# Altium footprint library Altium_Lib_Haris.PcbLib: 85 footprints (part 2 of 6)
Each footprint in its own frame and in the unit in brackets; x right, y up, seen from the top. Pads: shape width x height; smd on the part's side, far side on the other; paste and mask are expansions set on the pad; w line width, h text height; cw(c..) or ccw(c..) is an arc to the next point about the centre after c.
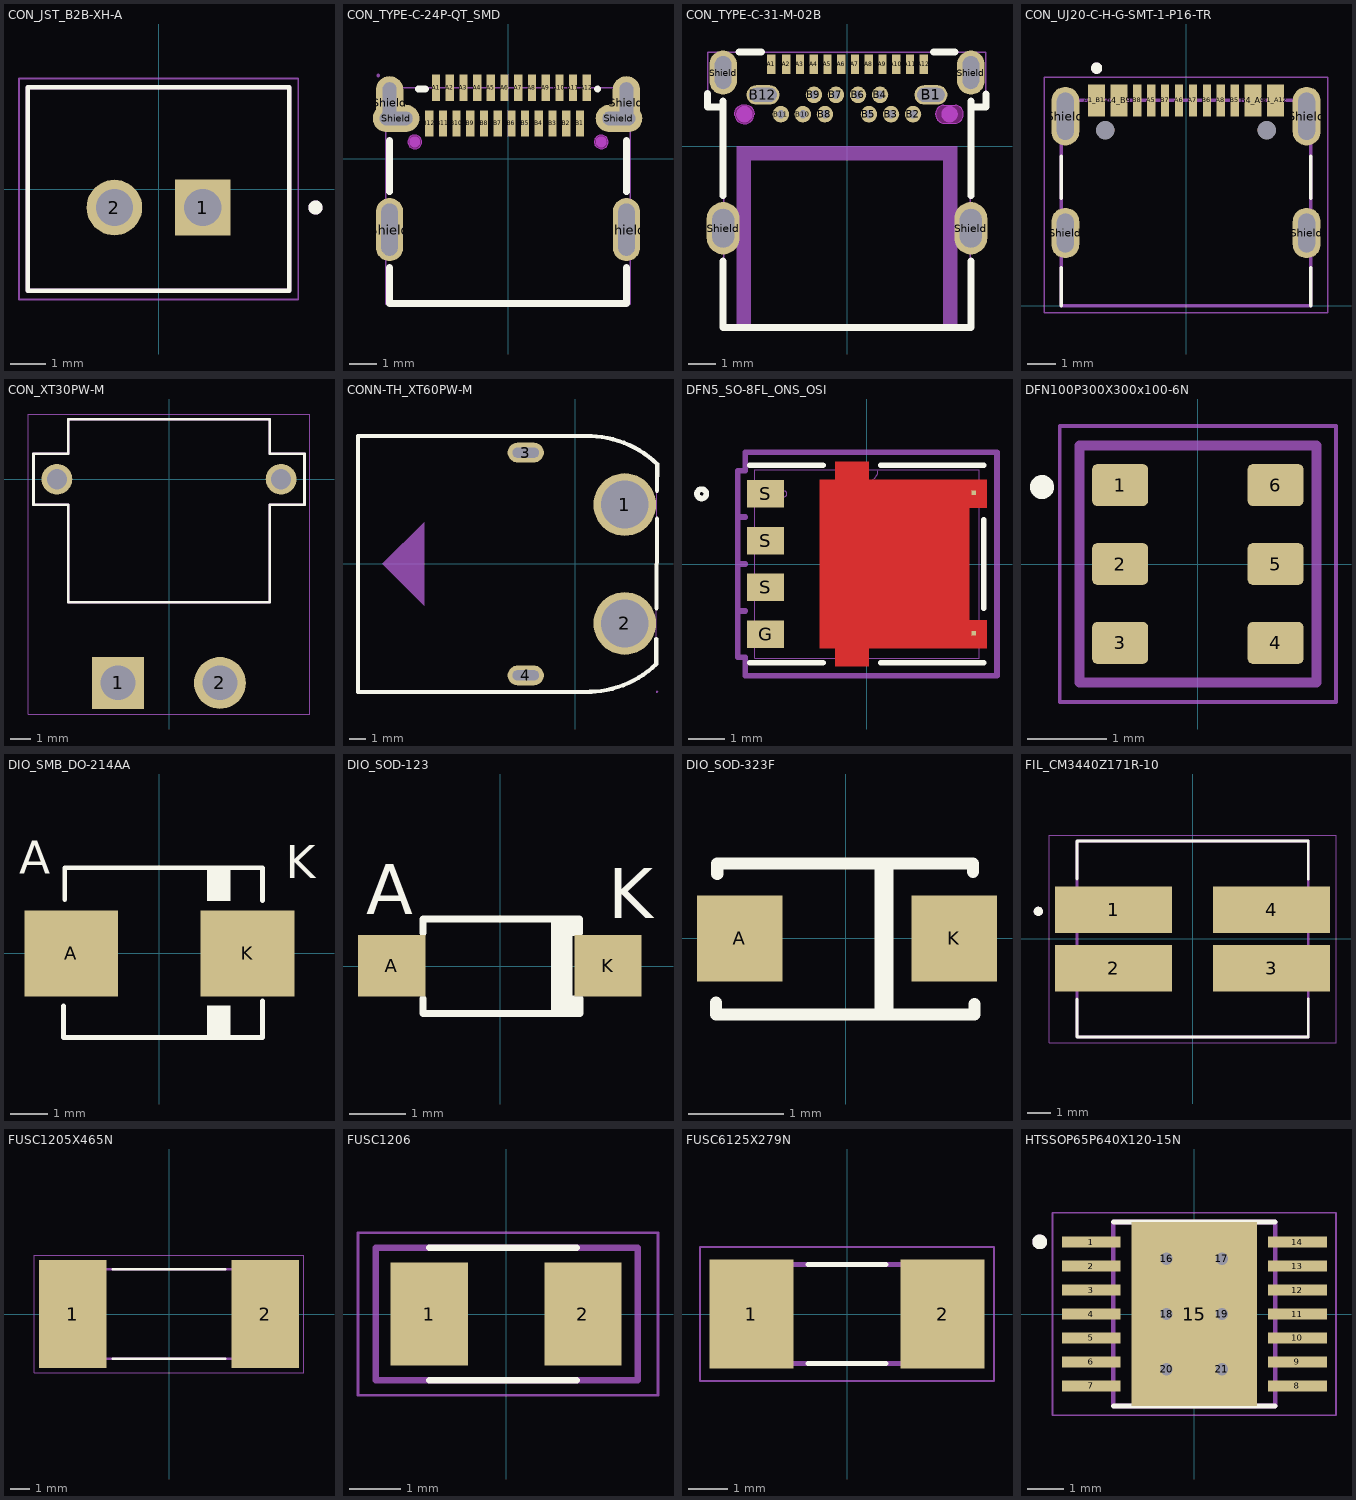
[diagram p1: the footprints below, top view; thin cyan lines are the x and y axes]

## CON_JST_B2B-XH-A [mm]
height 7
pads (2):
  rect 1.575x1.575 / inner round 1.575 / far side rect 1.575x1.575 hole 1.05: 1(1.25,-0.525)
  round 1.575 hole 1.05: 2(-1.25,-0.525)
Top Overlay:
  circle w0.2: c4.44,-0.525 r0.1
  lines w0.127: -3.7,-2.875 -3.7,2.875 3.7,2.875 3.7,-2.875 -3.7,-2.875
Mechanical 13:
  circle w0.2: c4.44,-0.525 r0.1
  lines w0.127: -3.7,-2.875 -3.7,2.875 3.7,2.875 3.7,-2.875 -3.7,-2.875
Mechanical 15:
  lines w0.05: -3.95,-3.125 3.95,-3.125 3.95,3.125 -3.95,3.125 -3.95,-3.125
3D body "B2B-XH-A--3DModel-STEP-56544.STEP": height 7.01, standoff -3.39, extent -3.7,-2.875 3.7,2.875

## CON_TYPE-C-24P-QT_SMD [mm]
pads (30):
  rect 0.3x0.95 smd paste-100 mask+0.05: A1(-2.625,2.587) A2(-2.125,2.587) A3(-1.625,2.587) A4(-1.125,2.587) A5(-0.625,2.587) A6(-0.125,2.587) A7(0.375,2.587) A8(0.875,2.587) A9(1.375,2.587) A10(1.875,2.587) A11(2.375,2.587) A12(2.875,2.587) B1(2.625,1.288) B2(2.125,1.288) B3(1.625,1.288) B4(1.125,1.288) B5(0.625,1.288) B6(0.125,1.288) B7(-0.375,1.288) B8(-0.875,1.288) B9(-1.375,1.288) B10(-1.875,1.288) B11(-2.375,1.288) B12(-2.875,1.288)
  oval 1x2.3 hole 0.6 slot 1.9 at 90 deg paste-2539.97 mask+0.05: Shield(-4.32,-2.587) Shield(4.32,-2.587)
  oval 1x1.95 hole 0.5 slot 1.5 at 90 deg: Shield(-4.318,2.032) Shield(4.318,2.032)
  oval 1.7x1 hole 0.5 slot 1.2 at 0 deg: Shield(-4.082,1.468) Shield(4.046,1.468)
Top Overlay:
  lines w0.254: -4.32,-3.969 -4.32,-5.287 4.32,-5.287 4.32,-3.969 ; -4.319,-1.206 -4.318,0.662 ; -3.273,2.54 -3.006,2.54 ; 3.256,2.54 3.273,2.54 ; 4.318,0.661 4.319,-1.206
Top Paste:
  drawing of 28 lines, arcs and shapes, not listed
Keep-Out Layer:
  board cut-out: 3.65,0.613 3.65,0.563 3.612,0.472 3.541,0.401 3.45,0.363 3.35,0.363 3.258,0.401 3.188,0.472 3.15,0.563 3.15,0.613 3.15,0.663 3.188,0.755 3.258,0.825 3.35,0.863 3.45,0.863 3.541,0.825 3.612,0.755 3.65,0.663
  board cut-out: -3.15,0.613 -3.15,0.563 -3.188,0.472 -3.258,0.401 -3.35,0.363 -3.45,0.363 -3.542,0.401 -3.612,0.472 -3.65,0.563 -3.65,0.613 -3.65,0.663 -3.612,0.755 -3.542,0.825 -3.45,0.863 -3.35,0.863 -3.258,0.825 -3.188,0.755 -3.15,0.663
Keep-Out Layer:
  circle w0.005: c3.4,0.613 r0.25
  circle w0.005: c-3.4,0.613 r0.25
  region: 3.65,0.613 3.65,0.563 3.612,0.472 3.541,0.401 3.45,0.363 3.35,0.363 3.258,0.401 3.188,0.472 3.15,0.563 3.15,0.613 3.15,0.663 3.188,0.755 3.258,0.825 3.35,0.863 3.45,0.863 3.541,0.825 3.612,0.755 3.65,0.663
  region: -3.15,0.613 -3.15,0.563 -3.188,0.472 -3.258,0.401 -3.35,0.363 -3.45,0.363 -3.542,0.401 -3.612,0.472 -3.65,0.563 -3.65,0.613 -3.65,0.663 -3.612,0.755 -3.542,0.825 -3.45,0.863 -3.35,0.863 -3.258,0.825 -3.188,0.755 -3.15,0.663
Mechanical 1:
  circle w0.005: c3.4,0.613 r0.25
  circle w0.005: c-3.4,0.613 r0.25
Mechanical 6:
  circle w0.2: c3.4,0.613 r0.1
  circle w0.2: c-3.4,0.613 r0.1
Mechanical 15:
  drawing of 35 lines, arcs and shapes, not listed
3D body "Type-C Connector.STEP": height 3.22, standoff -0.54, extent -4.475,-5.1 4.465,3

## CON_TYPE-C-31-M-02B [mil]
pads (28):
  rect 11.8x27.6 smd paste-3937 mask+2: A1(-108.25,117.25) A2(-87.05,117.25) A3(-67.35,117.25) A4(-47.65,117.25) A5(-27.95,117.25) A6(-8.25,117.25) A7(11.35,117.25) A8(31.05,117.25) A9(50.75,117.25) A10(70.45,117.25) A11(90.15,117.25) A12(109.85,117.25)
  oval 47.2x27.6 hole 19.7 slot 39.4 at 0 deg: B1(120.05,73.55) B12(-120.15,73.55)
  round 23.6 hole 11.8: B2(94.45,45.95) B3(62.95,45.95) B4(47.25,73.55) B5(31.45,45.95) B6(15.75,73.55) B7(-15.75,73.55) B8(-31.55,45.95) B9(-47.25,73.55) B10(-63.05,45.95) B11(-94.55,45.95)
  oval 47.2x74.8 hole 31.5 slot 55.1 at 90 deg: Shield(-177.15,-117.25) Shield(177.15,-117.25)
  oval 39.4x63 hole 23.6 slot 47.2 at 90 deg: Shield(-177.15,105.45) Shield(177.15,105.45)
Top Overlay:
  lines w10: -199.45,75.35 -199.45,55.85 -177.15,55.85 ; -177.15,-163.75 -177.15,-259.15 177.15,-259.15 177.15,-163.75 ; -177.15,-70.75 -177.15,64.85 ; -154.25,134.55 -122.55,134.55 ; 124.05,134.55 154.15,134.55 ; 177.15,-70.75 177.15,64.85 ; 177.15,56.45 198.65,56.45 198.65,74.45
Top Paste:
  drawing of 28 lines, arcs and shapes, not listed
Keep-Out Layer:
  board cut-out: -132.85,45.95 -133.25,42.75 -134.35,39.75 -136.15,37.15 -138.45,34.95 -141.25,33.35 -144.25,32.35 -147.45,32.25 -150.65,32.75 -153.55,34.05 -156.15,35.95 -158.15,38.35 -159.65,41.25 -160.35,44.35 -160.35,47.55 -159.65,50.65 -158.15,53.55 -156.15,55.95 -153.55,57.95 -150.65,59.15 -147.45,59.75 -144.25,59.55 -141.25,58.65 -138.45,57.05 -136.15,54.85 -134.35,52.15 -133.25,49.15
  board cut-out: 138.55,58.75 154.75,58.75 157.65,58.35 160.45,57.25 162.75,55.45 164.55,53.05 165.75,50.25 166.15,47.35 166.15,45.75 166.15,44.55 165.75,41.65 164.55,38.85 162.75,36.55 160.45,34.65 157.65,33.55 154.75,33.15 138.95,33.15 136.25,33.45 133.65,34.35 131.35,35.85 129.45,37.75 127.95,40.05 127.05,42.65 126.75,45.35 126.75,45.75 126.75,46.95 127.05,49.55 127.95,52.05 129.35,54.35 131.15,56.15 133.45,57.55 135.95,58.45 138.55,58.75
Keep-Out Layer:
  drawing of 41 lines, arcs and shapes, not listed
Mechanical 1:
  lines w0.1: -160.35,44.35 -159.65,41.25 -158.15,38.35 -156.15,35.95 -153.55,34.05 -150.65,32.75 -147.45,32.25 -144.25,32.35 -141.25,33.35 -138.45,34.95 -136.15,37.15 -134.35,39.75 -133.25,42.75 -132.85,45.95 -133.25,49.15 -134.35,52.15 -136.15,54.85 -138.45,57.05 -141.25,58.65 -144.25,59.55 -147.45,59.75 -150.65,59.15 -153.55,57.95 -156.15,55.95 -158.15,53.55 -159.65,50.65 -160.35,47.55 -160.35,44.35 ; 126.75,45.35 ccw(c138.95,45.35) 138.95,33.15 154.75,33.15 ccw(c154.75,44.55) 166.15,44.55 166.15,45.75 166.15,47.35 ccw(c154.75,47.35) 154.75,58.75 138.55,58.75 ccw(c138.55,46.95) 126.75,46.95 126.75,45.75 126.75,45.35
Mechanical 6:
  region: -157.45,-255.95 -157.45,0.05 157.45,0.05 157.45,-255.95 137.75,-255.95 137.75,-19.65 -137.85,-19.65 -137.85,-255.95
  lines w11.8: -152.55,45.95 -152.25,43.95 -151.25,42.15 -149.65,40.85 -147.65,40.15 -145.65,40.15 -143.75,40.85 -142.15,42.15 -141.15,43.95 -140.75,45.95 -141.15,48.05 -142.15,49.75 -143.75,51.15 -145.65,51.85 -147.65,51.85 -149.65,51.15 -151.25,49.75 -152.25,48.05 -152.55,45.95 ; 140.75,45.95 141.05,43.95 142.15,42.15 143.65,40.85 145.65,40.15 147.65,40.15 149.55,40.85 151.15,42.15 152.15,43.95 152.55,45.95 152.15,48.05 151.15,49.75 149.55,51.15 147.65,51.85 145.65,51.85 143.65,51.15 142.15,49.75 141.05,48.05 140.75,45.95
Mechanical 7:
  lines w2: -198.85,55.85 -198.85,134.55 198.75,134.55 198.75,55.85 175.95,55.85 175.95,-259.15 -176.05,-259.15 -176.05,55.85 -198.85,55.85
Mechanical 9:
  region: -113.25,127.05 -103.35,127.05 -103.35,107.35 -113.25,107.35
  region: 104.85,127.05 114.75,127.05 114.75,107.35 104.85,107.35
  region: 85.25,127.05 95.05,127.05 95.05,107.35 85.25,107.35
  region: 65.55,127.05 75.35,127.05 75.35,107.35 65.55,107.35
  region: 45.85,127.05 55.65,127.05 55.65,107.35 45.85,107.35
  region: 26.15,127.05 35.95,127.05 35.95,107.35 26.15,107.35
  region: 6.45,127.05 16.35,127.05 16.35,107.35 6.45,107.35
  region: -13.25,127.05 -3.35,127.05 -3.35,107.35 -13.25,107.35
  region: -32.85,127.05 -23.05,127.05 -23.05,107.35 -32.85,107.35
  region: -52.55,127.05 -42.75,127.05 -42.75,107.35 -52.55,107.35
  region: -72.25,127.05 -62.45,127.05 -62.45,107.35 -72.25,107.35
  region: -91.95,127.05 -82.15,127.05 -82.15,107.35 -91.95,107.35
  region: -20.35,76.45 -11.25,76.45 -11.25,70.55 -20.35,70.55
  region: 11.15,76.45 20.25,76.45 20.25,70.55 11.15,70.55
  region: -51.75,76.45 -42.75,76.45 -42.75,70.55 -51.75,70.55
  region: 42.65,76.45 51.75,76.45 51.75,70.55 42.65,70.55
  region: -36.05,48.95 -26.95,48.95 -26.95,43.05 -36.05,43.05
  region: 26.95,48.95 36.05,48.95 36.05,43.05 26.95,43.05
  region: -67.55,48.95 -58.45,48.95 -58.45,43.05 -67.55,43.05
  region: 58.45,48.95 67.45,48.95 67.45,43.05 58.45,43.05
  region: -99.05,48.95 -89.95,48.95 -89.95,43.05 -99.05,43.05
  region: 89.95,48.95 98.95,48.95 98.95,43.05 89.95,43.05
  region: 124.55,76.45 124.55,70.55 115.55,70.55 115.55,76.45
  region: -115.55,76.45 -115.55,70.55 -124.65,70.55 -124.65,76.45
  region: 183.05,89.65 171.25,89.65 171.25,121.15 183.05,121.15
  region: -171.25,89.65 -183.05,89.65 -183.05,121.15 -171.25,121.15
  region: -171.25,-136.95 -183.05,-136.95 -183.05,-97.55 -171.25,-97.55
  region: 183.05,-136.95 171.25,-136.95 171.25,-97.55 183.05,-97.55
3D body "3D_PCB1_2026-08-06.step": height 125.3, standoff -53.44, extent -198.19,-259.58 199.44,134.13

## CON_UJ20-C-H-G-SMT-1-P16-TR [mm]
height 3.46
pads (18):
  rect 0.6x1.15 smd: A1_B12(-3.2,7.345) A4_B9(-2.4,7.345) B1_A12(3.2,7.345) B4_A9(2.4,7.345)
  rect 0.3x1.15 smd: A5(-1.25,7.345) A6(-0.25,7.345) A7(0.25,7.345) A8(1.25,7.345) B5(1.75,7.345) B6(0.75,7.345) B7(-0.75,7.345) B8(-1.75,7.345)
  oval 1x1.8 hole 0.6 slot 1.4 at 90 deg: Shield(-4.32,2.6) Shield(4.32,2.6)
  oval 1x2.1 hole 0.6 slot 1.7 at 90 deg: Shield(-4.32,6.78) Shield(4.32,6.78)
  round 0.65 hole 0.65 unplated: ""(-2.89,6.28) ""(2.89,6.28)
Top Overlay:
  circle w0.2: c-3.2,8.5 r0.1
  lines w0.127: -4.47,0 -4.47,1.35 ; -4.47,3.85 -4.47,5.35 ; 4.47,0 4.47,1.35 ; 4.47,3.85 4.47,5.35
Mechanical 13:
  circle w0.2: c-3.2,8.5 r0.1
  lines w0.127: -4.47,0 -4.47,7.35 4.47,7.35 4.47,0 -4.47,0
Mechanical 15:
  lines w0.05: -5.07,-0.25 -5.07,8.17 5.07,8.17 5.07,-0.25 -5.07,-0.25
3D body "step_temp.STEP": height 3.31, standoff -0.96, extent -4.47,0 4.47,7.6

## CON_XT30PW-M [mm]
height 5
pads (4):
  rect 2.55x2.55 / inner round 2.55 / far side rect 2.55x2.55 hole 1.7: 1(-2.5,-10)
  round 2.55 hole 1.7: 2(2.5,-10)
  round 1.508 hole 1: ""(-5.5,0) ""(5.5,0)
Top Overlay:
  lines w0.127: -6.65,-1.25 -6.65,1.25 -4.95,1.25 -4.95,2.95 4.95,2.95 4.95,1.25 6.65,1.25 6.65,-1.25 4.95,-1.25 4.95,-6.05 -4.95,-6.05 -4.95,-1.25 -6.65,-1.25
Mechanical 13:
  lines w0.127: -6.65,-1.25 -6.65,1.25 -4.95,1.25 -4.95,2.95 4.95,2.95 4.95,1.25 6.65,1.25 6.65,-1.25 4.95,-1.25 4.95,-6.05 -4.95,-6.05 -4.95,-1.25 -6.65,-1.25
Mechanical 15:
  lines w0.05: -6.9,-11.525 6.9,-11.525 6.9,3.2 -6.9,3.2 -6.9,-11.525
3D body "step_temp.STEP": height 5, standoff -2, extent -6.65,-11 6.65,2.95

## CONN-TH_XT60PW-M [mm]
pads (4):
  round 3.8 hole 2.901 paste-2539.97 mask+0.051: 1(3,3.599) 2(3,-3.602)
  oval 2.2x1.199 hole 0.599 slot 1.6 at 0 deg paste-2539.97 mask+0.051: 3(-3,6.749) 4(-3,-6.751)
Top Overlay:
  lines w0.254: 0.889,-7.747 1.232,-7.729 1.575,-7.694 1.913,-7.635 2.248,-7.559 2.578,-7.463 2.903,-7.348 3.221,-7.216 3.528,-7.066 3.828,-6.899 4.117,-6.713 4.397,-6.513 4.663,-6.294 4.917,-6.063 ; 0.937,7.747 1.28,7.727 1.623,7.691 1.961,7.633 2.296,7.556 2.626,7.46 2.951,7.346 3.269,7.214 3.576,7.064 3.876,6.896 4.166,6.711 4.445,6.51 4.712,6.292 4.966,6.06 4.958,4.44 ; 1.001,-7.752 -13.165,-7.752 -13.165,7.75 1.001,7.75 ; 4.902,-5.994 4.91,-4.544 ; 4.92,-2.677 4.948,2.738
Mechanical 6:
  region: -9.144,2.54 -9.144,-2.54 -11.684,0
Mechanical 7:
  lines w0.051: -13.165,-7.747 -13.165,7.747 1.016,7.747 1.778,7.62 2.794,7.366 3.81,6.858 4.826,6.096 4.953,5.969 4.902,-5.994 4.699,-6.223 3.937,-6.858 3.175,-7.239 2.159,-7.493 1.143,-7.747 -13.165,-7.747
Mechanical 8:
  region: 5.014,-7.747 5.004,-7.78 4.978,-7.803 4.945,-7.808 4.915,-7.793 4.897,-7.765 4.897,-7.732 4.915,-7.704 4.945,-7.689 4.978,-7.694 5.004,-7.717
Mechanical 9:
  region: -2.4,-6.551 -2.4,-6.952 -3.599,-6.952 -3.599,-6.551
  region: -2.4,6.949 -2.4,6.548 -3.599,6.548 -3.599,6.949
  region: 4,-3.602 3.99,-3.739 3.962,-3.876 3.914,-4.008 3.848,-4.13 3.767,-4.244 3.67,-4.343 3.561,-4.43 3.439,-4.501 3.31,-4.552 3.175,-4.585 3.035,-4.6 2.896,-4.595 2.758,-4.572 2.626,-4.529 2.499,-4.468 2.385,-4.389 2.281,-4.295 2.192,-4.188 2.118,-4.072 2.06,-3.942 2.022,-3.81 2.004,-3.67 2.004,-3.531 2.022,-3.393 2.06,-3.259 2.118,-3.132 2.192,-3.012 2.281,-2.906 2.385,-2.812 2.499,-2.736 2.626,-2.675 2.758,-2.631 2.896,-2.606 3.035,-2.601 3.175,-2.616 3.31,-2.649 3.439,-2.703 3.561,-2.771 3.67,-2.857 3.767,-2.959 3.848,-3.071 3.914,-3.195 3.962,-3.325 3.99,-3.462
  region: 4,3.599 3.99,3.459 3.962,3.322 3.914,3.193 3.848,3.068 3.767,2.957 3.67,2.855 3.561,2.769 3.439,2.7 3.31,2.647 3.175,2.614 3.035,2.598 2.896,2.603 2.758,2.629 2.626,2.672 2.499,2.733 2.385,2.812 2.281,2.903 2.192,3.01 2.118,3.129 2.06,3.256 2.022,3.391 2.004,3.528 2.004,3.668 2.022,3.807 2.06,3.942 2.118,4.069 2.192,4.186 2.281,4.293 2.385,4.387 2.499,4.465 2.626,4.526 2.758,4.569 2.896,4.595 3.035,4.597 3.175,4.585 3.31,4.549 3.439,4.498 3.561,4.427 3.67,4.343 3.767,4.242 3.848,4.13 3.914,4.006 3.962,3.873 3.99,3.739
3D body "XT60PW-M.stp": height 8.16, standoff -3.29, extent -13.3,-7.95 4.9,7.95

## DFN5_SO-8FL_ONS_OSI [mm]
pads (6):
  rect 0.127x0.127 smd paste-0.064 mask-0.064: D(2.896,-1.88) D(2.896,1.93)
  rect 1x0.75 smd paste-0.375 mask+0: G(-2.748,-1.905) S(-2.748,-0.635) S(-2.748,0.635) S(-2.748,1.905)
Top Layer:
  region: -1.282,-2.28 -1.282,2.28 -0.857,2.28 -0.857,2.775 0.048,2.775 0.048,2.28 3.247,2.28 3.247,1.53 2.773,1.53 2.773,-1.53 3.247,-1.53 3.247,-2.28 0.048,-2.28 0.048,-2.775 -0.857,-2.775 -0.857,-2.28
Top Overlay:
  circle w0.152: c-4.484,1.905 r0.127
  lines w0.152: -3.175,-2.68 -1.19,-2.68 ; -3.175,2.68 -1.19,2.68 ; 0.38,-2.68 3.175,-2.68 ; 0.38,2.68 3.175,2.68 ; 3.175,-1.197 3.175,1.197
Top Paste:
  region: -1.282,-2.28 -1.282,2.28 -0.857,2.28 -0.857,2.775 0.048,2.775 0.048,2.28 3.247,2.28 3.247,1.53 2.773,1.53 2.773,-1.53 3.247,-1.53 3.247,-2.28 0.048,-2.28 0.048,-2.775 -0.857,-2.775 -0.857,-2.28
Top Solder:
  region: -1.282,-2.28 -1.282,2.28 -0.857,2.28 -0.857,2.775 0.048,2.775 0.048,2.28 3.247,2.28 3.247,1.53 2.773,1.53 2.773,-1.53 3.247,-1.53 3.247,-2.28 0.048,-2.28 0.048,-2.775 -0.857,-2.775 -0.857,-2.28
Mechanical 13:
  circle w0.025: c-2.248,1.905 r0.076
  lines w0.025: -0.305,2.553 ccw(c0,2.553) 0.305,2.553 ; -3.048,-2.553 3.048,-2.553 3.048,2.553 -3.048,2.553 -3.048,-2.553
Mechanical 15:
  lines w0.152: -3.501,-2.534 -3.501,-1.276 -3.302,-1.276 -3.302,-1.264 -3.501,-1.264 -3.501,-0.006 -3.302,-0.006 -3.302,0.006 -3.501,0.006 -3.501,1.264 -3.302,1.264 -3.302,1.276 -3.501,1.276 -3.501,2.534 -3.302,2.534 -3.302,3.035 3.531,3.035 3.531,-3.035 -3.302,-3.035 -3.302,-2.534 -3.501,-2.534
3D body "NVMFS3D0P04M8LT1G.stp": height 1.1, standoff 0, extent -3.05,-2.575 3.1,2.575

## DFN100P300X300x100-6N [mm]
pads (6):
  rrect25% 0.71x0.53 smd: 1(-0.985,1) 2(-0.985,0) 3(-0.985,-1) 4(0.985,-1) 5(0.985,0) 6(0.985,1)
Top Overlay:
  circle w0.152: c-1.975,0.975 r0.076
Mechanical 13:
  lines w0.127: -1.5,-1.5 1.5,-1.5 1.5,1.5 -1.5,1.5 -1.5,-1.5
Mechanical 15:
  lines w0.05: -1.75,-1.75 -1.75,1.75 1.75,1.75 1.75,-1.75 -1.75,-1.75
3D body "SENSOR_AHT20_GAE.step": height 0.99, standoff 0, extent -1.448,-1.474 1.55,1.524

## DIO_SMB_DO-214AA [mm] "Diode"
height 2.47
pads (2):
  rect 2.5x2.3 smd: A(-2.35,0) K(2.354,0)
Top Overlay:
  rectangle: 1.27,-2.25 1.905,-1.397
  rectangle: 1.27,1.397 1.905,2.286
  lines w0.127: -2.563,-2.246 -2.563,-1.407 ; -2.546,-2.246 2.751,-2.246 2.751,-1.27 ; -2.526,1.43 -2.526,2.286 2.754,2.286 2.754,1.402
  text "K" at 3.375,2 h0.89
  text "A" at -3.75,2.125 h0.89
3D body "DO-214AA SMB.step": height 2.27, standoff -0.03, extent -2.557,-1.838 2.843,1.762

## DIO_SOD-123 [mm] "DIODE GEN PURP"
height 1.35
pads (2):
  rect 1.2x1.1 smd mask+0.076: A(-1.937,0.006) K(1.923,0.006)
Top Overlay:
  region: 0.901,0.856 0.912,0.844 0.912,-0.844 1.418,-0.844 1.415,-0.528 1.288,-0.528 1.288,0.539 1.441,0.539 1.443,0.844 0.91,0.844
  lines w0.127: -1.381,-0.579 -1.381,-0.844 1.418,-0.844 1.418,-0.579 ; -1.381,0.59 -1.381,0.844 1.415,0.844 ; 1.415,0.59 1.415,0.816
  text "A" at -2.388,0.923 h0.89
  text "K" at 1.925,0.856 h0.89
3D body "SOD-123_DiodesInc.STEP": height 1.43, standoff -0.02, extent -1.925,-0.844 1.925,0.856

## DIO_SOD-323F [mm] "Diode"
height 1
pads (2):
  rect 0.9x0.9 smd: A(-1.113,0) K(1.137,0)
Top Overlay:
  rectangle: 0.3,-0.8 0.503,0.775
  lines w0.127: -1.363,-0.675 -1.363,-0.8 1.35,-0.8 1.35,-0.687 ; -1.35,0.675 -1.35,0.787 1.337,0.787 1.337,0.7
3D body "SOD-323F.STEP": height 0.79, standoff -0.08, extent -1.35,-0.675 1.35,0.675

## FIL_CM3440Z171R-10 [mm]
height 10.49
pads (4):
  rect 5.08x2.03 smd: 1(-3.43,1.27) 2(-3.43,-1.27) 3(3.43,-1.27) 4(3.43,1.27)
Top Overlay:
  circle w0.2: c-6.7,1.2 r0.1
  lines w0.127: -5.015,-2.605 -5.015,-4.255 5.015,-4.255 5.015,-2.605 ; -5.015,2.605 -5.015,4.255 5.015,4.255 5.015,2.605
Mechanical 13:
  circle w0.2: c-6.7,1.2 r0.1
  lines w0.127: -5.015,-4.255 -5.015,4.255 5.015,4.255 5.015,-4.255 -5.015,-4.255
Mechanical 15:
  lines w0.05: -6.22,-4.505 6.22,-4.505 6.22,4.505 -6.22,4.505 -6.22,-4.505
3D body "step_temp.STEP": height 10.49, standoff 0, extent -5.525,-4.255 5.525,4.255

## FUSC1205X465N [mm]
pads (2):
  rect 3.5x5.6 smd: 1(-5,0) 2(5,0)
Top Overlay:
  lines w0.127: -2.93,-2.325 2.93,-2.325 ; -2.93,2.325 2.93,2.325
Mechanical 13:
  lines w0.127: -6.05,-2.325 -6.05,2.325 6.05,2.325 6.05,-2.325 -6.05,-2.325
Mechanical 15:
  lines w0.05: -7,-3.05 -7,3.05 7,3.05 7,-3.05 -7,-3.05

## FUSC1206 [mm]
pads (2):
  rect 1.52x2.03 smd: 1(-1.512,0) 2(1.513,0)
Top Overlay:
  lines w0.127: -1.512,-1.3 1.388,-1.3 ; -1.512,1.3 1.388,1.3
Mechanical 13:
  lines w0.127: -2.562,-1.3 -2.562,1.3 2.588,1.3 2.588,-1.3 -2.562,-1.3
Mechanical 15:
  lines w0.05: -2.912,-1.6 -2.912,1.6 2.988,1.6 2.988,-1.6 -2.912,-1.6
3D body "0685T5000-01.step": height 0.84, standoff 0.01, extent -1.5,-0.79 1.7,0.79

## FUSC6125X279N [mm]
pads (2):
  rect 2.15x2.8 smd: 1(-2.455,0) 2(2.455,0)
Top Overlay:
  lines w0.127: -1,-1.27 1,-1.27 ; -1,1.27 1,1.27
Mechanical 13:
  lines w0.127: -3.05,-1.27 -3.05,1.27 3.05,1.27 3.05,-1.27 -3.05,-1.27
Mechanical 15:
  lines w0.05: -3.78,-1.72 3.78,-1.72 3.78,1.72 -3.78,1.72 -3.78,-1.72
3D body "step_temp.STEP": height 2.79, standoff 0, extent -3.05,-1.27 3.05,1.27

## HTSSOP65P640X120-15N [mm]
pads (21):
  rect 1.6x0.3 smd paste-0.025: 1(-2.8,1.95) 2(-2.8,1.3) 3(-2.8,0.65) 4(-2.8,0) 5(-2.8,-0.65) 6(-2.8,-1.3) 7(-2.8,-1.95) 8(2.8,-1.95) 9(2.8,-1.3) 10(2.8,-0.65) 11(2.8,0) 12(2.8,0.65) 13(2.8,1.3) 14(2.8,1.95)
  rect 3.4x5 smd paste-3 mask+0: 15(0,0)
  round 0.44 hole 0.33 mask+0: 16(-0.75,1.5) 17(0.75,1.5) 20(-0.75,-1.5) 21(0.75,-1.5)
  round 0.44 hole 0.33: 18(-0.75,0) 19(0.75,0)
Top Overlay:
  circle w0.2: c-4.2,1.96 r0.1
  lines w0.127: -2.2,-2.5 2.2,-2.5 ; -2.2,2.5 2.2,2.5
Top Paste:
  region: 1.23,-1.155 -1.23,-1.155 -1.23,1.155 1.23,1.155
Top Solder:
  region: 1.23,-1.155 -1.23,-1.155 -1.23,1.155 1.23,1.155
Mechanical 13:
  circle w0.2: c-4.2,1.96 r0.1
  lines w0.127: -2.2,-2.5 2.2,-2.5 2.2,2.5 -2.2,2.5 -2.2,-2.5
Mechanical 15:
  lines w0.05: -3.85,-2.75 3.85,-2.75 3.85,2.75 -3.85,2.75 -3.85,-2.75
3D body "step_temp.STEP": height 1.2, standoff 0, extent -3.2,-2.5 3.2,2.5